# Altium integrated library 5001.IntLib: 1 symbol
Pins are listed as number, name and electrical type; pins without a type are passive.

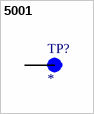
[diagram p0: symbol 5001]

## 5001
designator TP?
MF: Keystone Electronics; MP: 5001; Package: None; Price: None; Value: *; Availability: Unavailable
footprint KEYSTONE_5001
pins: TP